# Altium schematic symbol library 磁珠.SchLib: 2 symbols
Pins are listed as number, name and electrical type; pins without a type are passive.

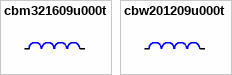
[diagram p0: symbols cbm321609u000t to cbw201209u000t]

## cbm321609u000t
designator BEAD??  (value not drawn)
阻抗@频率:0Ω@100MHz;直流电阻(DCR):10mΩ;; Manufacturer: FH(风华); AddInBom: yes; ModelId: 85bdab7b3d4c4074b81d208eb5e865b3; ModelName: L1206_L3.2-W1.6-H1.1; ModelTransform: 125.984,62.835,0,0,0,0,0,0,0; DC Resistance(DCR): 10mΩ; Current Rating: 6A; Number of Circuits: 1; Symbol: CBM321609U000T; LCSC Part Name: 单路 1206磁珠 阻抗0Ω@100MHz; SupplierPart: C391206; ManufacturerPart: CBM321609U000T; Supplier Footprint: 1206; JLCPCB Part Class: Extended Part; Datasheet: https://item.szlcsc.com/datasheet/CBM321609U000T/367610.html; Supplier: LCSC; ConvertToPcb: yes; FootprintName: L1206; Impedance @ Frequency: 0Ω@100MHz; Operating Temperature: -55℃~+125℃
footprint L1206
pins: 1, 2

## cbw201209u000t
designator L??  (value not drawn)
阻抗@频率:0Ω@100MHz;直流电阻(DCR):20mΩ;; Manufacturer: FH(风华); AddInBom: yes; ModelId: 37a81e68749a4138bd2dfa6897b24b85; ModelName: R0805_L2.0-W1.3-H0.6; ModelTransform: 78.74,51.181,0,0,0,0,0,0.001,0; DC Resistance(DCR): 20mΩ; Current Rating: 3A; Number of Circuits: 1; Symbol: CBW201209U000T; LCSC Part Name: 单路 0805磁珠 阻抗0Ω@100MHz; SupplierPart: C139184; ManufacturerPart: CBW201209U000T; Supplier Footprint: 0805; JLCPCB Part Class: Extended Part; Datasheet: https://item.szlcsc.com/datasheet/CBW201209U000T/150505.html; Supplier: LCSC; ConvertToPcb: yes; FootprintName: L0805; Impedance @ Frequency: 0Ω@100MHz; Operating Temperature: -55℃~+125℃
footprint L0805
pins: 1, 2